# Altium footprint library Diode$.PcbLib: 98 footprints (part 3 of 7)
Each footprint in its own frame and in the unit in brackets; x right, y up, seen from the top. Pads: shape width x height; smd on the part's side, far side on the other; paste and mask are expansions set on the pad; w line width, h text height; cw(c..) or ccw(c..) is an arc to the next point about the centre after c.
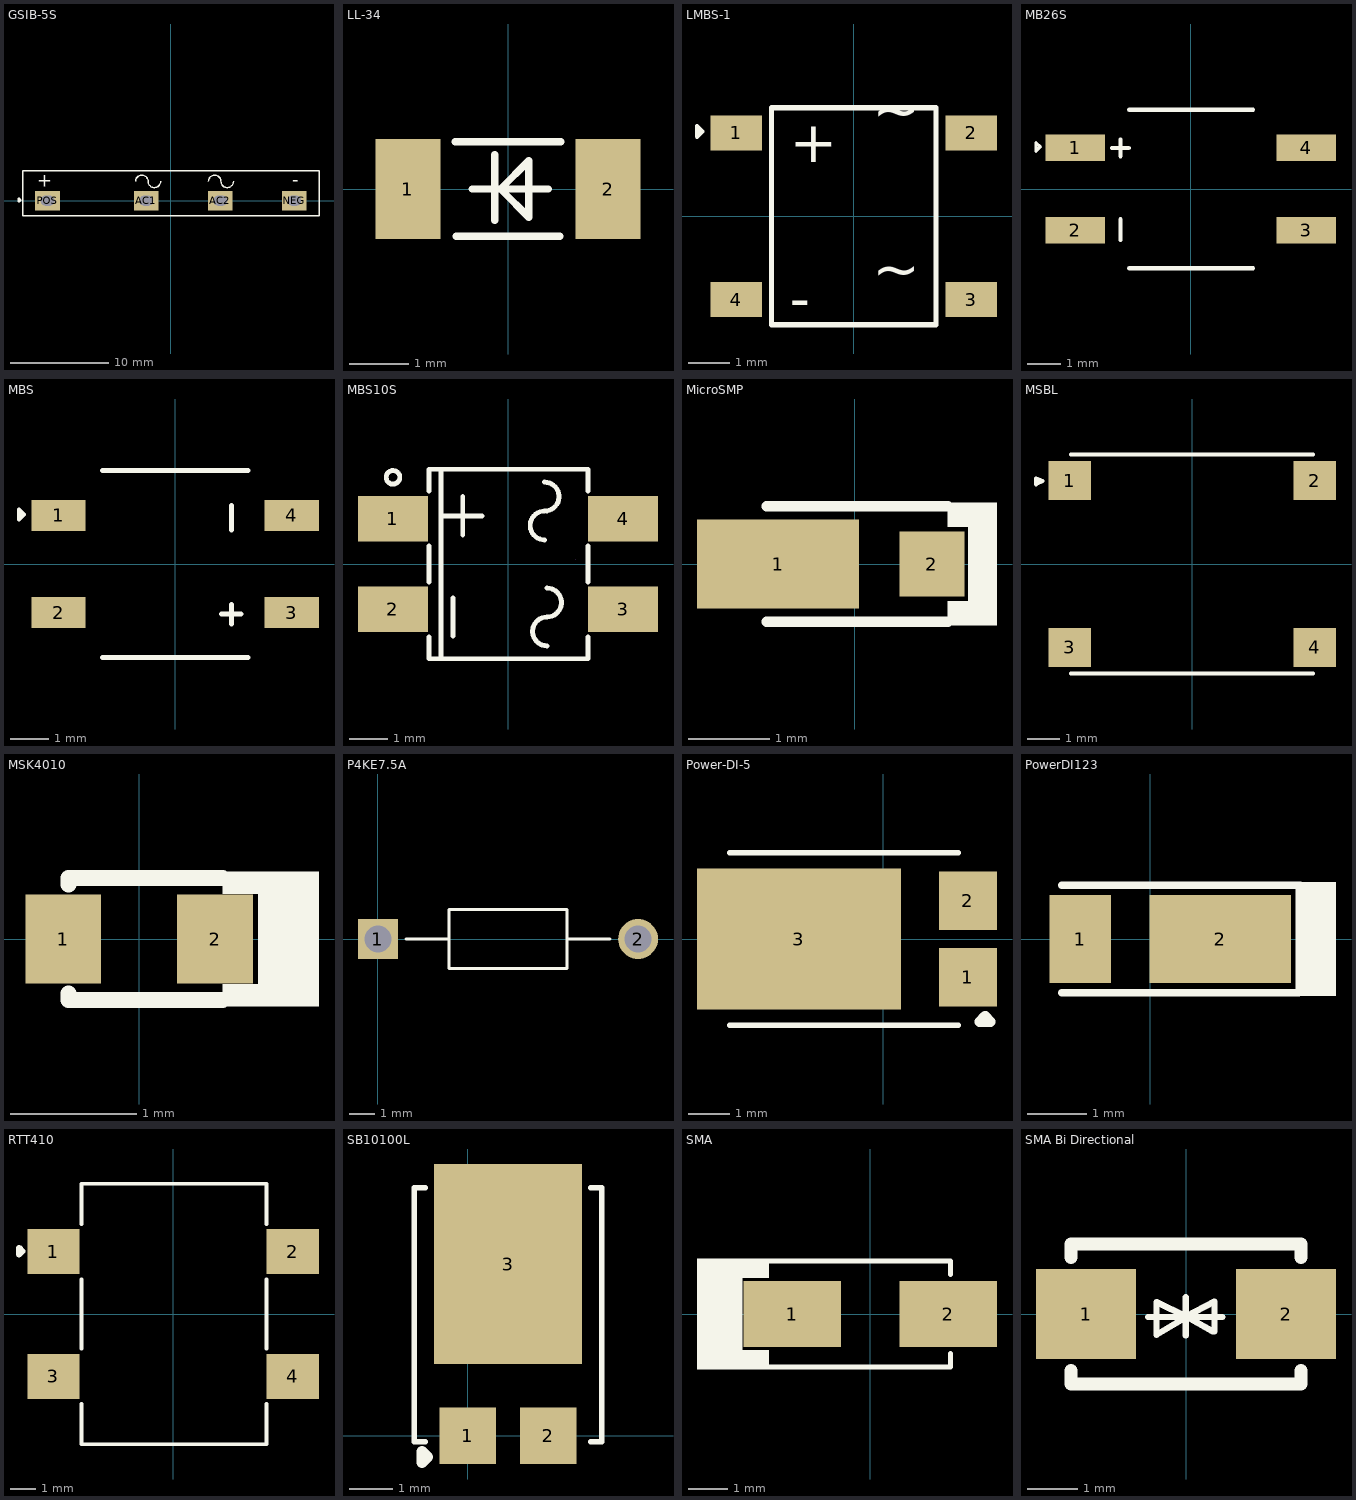
[diagram p2: the footprints below, top view; thin cyan lines are the x and y axes]

## GSIB-5S [mm]
pads (4):
  rect 2.5x2 hole 1 slot 1.37 at 0 deg: AC1(-2.5,0) AC2(5,0) NEG(12.5,0) POS(-12.5,0)
Top Overlay:
  lines w0.127: -3.585,1.956 cw(c-2.95,1.956) -2.315,1.956 ccw(c-1.68,1.956) -1.045,1.956 ; 3.797,1.956 cw(c4.432,1.956) 5.067,1.956 ccw(c5.702,1.956) 6.337,1.956 ; -15,-1.55 15,-1.55 15,3.05 -15,3.05 -15,-1.55
  lines w0.254: -15.396,-0.076 -15.396,0.178 -15.269,0.051 -15.396,-0.076
  text "+" at -12.043,2.584 h1.33
  text "-" at 12.951,2.493 h1.33
3D body "GSIB2560-E3-45.step": height 26.3, standoff -12, extent -15,-1.55 15,3.05

## LL-34 [mm]
pads (2):
  rect 1.1x1.7 smd paste+0 mask+0.051: 1(-1.7,0) 2(1.7,0)
Top Overlay:
  lines w0.127: -0.9,0.8 0.9,0.8 ; -0.878,-0.8 0.878,-0.8 ; -0.61,0 0.686,0 ; -0.229,-0.533 -0.229,0.584 ; -0.127,0 0.356,0.483 0.356,-0.483 -0.102,-0.025
3D body "C435829.step": height 1.5, standoff 0, extent -1.701,-0.745 1.702,0.745

## LMBS-1 [mm]
pads (4):
  rect 1.235x0.84 smd: 1(-2.817,2) 2(2.817,2) 3(2.817,-2) 4(-2.817,-2)
Top Overlay:
  lines w0.1: -3.759,1.905 -3.632,2.032 -3.759,2.159 -3.759,1.905
  lines w0.127: -1.971,-2.601 1.971,-2.601 1.971,2.601 -1.971,2.601 -1.971,-2.601
  text "+" at -1.53,1.29 h1
  text "-" at -1.53,-2.456 h1
  text "~" at 1.6,2.921 h1
  text "~" at 1.6,-0.889 h1
3D body "C435904.step": height 1.6, standoff 0, extent -3.1,-2.65 3.1,2.65

## MB26S [mm]
pads (4):
  rect 1.8x0.8 smd: 1(-3.5,1.25) 2(-3.5,-1.25) 3(3.5,-1.25) 4(3.5,1.25)
Top Overlay:
  lines w0.1: -4.694,1.148 -4.567,1.275 -4.694,1.402 -4.694,1.148
  lines w0.127: -2.388,1.245 -1.88,1.245 ; -2.134,-1.549 -2.134,-0.914 ; -2.134,0.991 -2.134,1.499 ; -1.867,-2.4 1.883,-2.4 ; -1.867,2.4 1.883,2.4
3D body "MB6S-TP.STEP": height 2.65, standoff 0.05, extent -3.497,-2.348 3.497,2.348

## MBS [mm]
pads (4):
  rect 1.4x0.8 smd: 1(-3,1.25) 2(-3,-1.25) 3(3,-1.25) 4(3,1.25)
Top Overlay:
  lines w0.1: -4.016,1.148 -4.016,1.402 -3.889,1.275 -4.016,1.148
  lines w0.127: -1.875,-2.4 1.875,-2.4 ; -1.875,2.4 1.875,2.4 ; 1.191,-1.29 1.699,-1.29 ; 1.445,-1.544 1.445,-1.036 ; 1.445,0.869 1.445,1.504
3D body "MB6S-TP.STEP": height 2.65, standoff 0.05, extent -3.497,-2.348 3.497,2.348

## MBS10S [mm]
pads (4):
  rect 1.84x1.2 smd paste+0 mask+0.051: 1(-3.037,1.2) 2(-3.036,-1.2) 3(3.037,-1.2) 4(3.036,1.2)
Top Overlay:
  circle w0.127: c-3.035,2.286 r0.18
  lines w0.127: -2.087,-1.921 -2.087,-2.5 2.113,-2.5 2.113,-1.921 ; -2.087,-0.479 -2.087,0.479 ; -2.087,1.921 -2.087,2.5 2.113,2.5 2.113,1.921 ; -1.763,-2.5 -1.763,2.5 ; -1.701,1.27 -0.685,1.27 ; -1.447,-1.905 -1.447,-0.889 ; -1.193,0.762 -1.193,1.778 ; 0.966,0.635 cw(c0.966,1.016) 0.966,1.397 ccw(c0.966,1.778) 0.966,2.159 ; 1.029,-2.159 cw(c1.029,-1.778) 1.029,-1.397 ccw(c1.029,-1.016) 1.029,-0.635 ; 2.113,-0.479 2.113,0.479
Mechanical 15:
  lines w0.003: 1.791,0.127 1.792,0.127
3D body "MBS10S (2).STEP": height 2.62, standoff 0, extent -3.475,-2.35 3.525,2.35

## MicroSMP [mm]
pads (2):
  rect 2x1.1 smd paste+0 mask+0.051: 1(-0.95,0)
  rect 0.8x0.8 smd paste+0 mask+0.051: 2(0.95,0)
Top Overlay:
  region: 1.753,0.762 1.397,0.762 1.397,-0.762 1.753,-0.762
  rectangle: 1.143,0.457 1.422,0.762
  rectangle: 1.143,-0.762 1.422,-0.457
  lines w0.127: -1.092,-0.711 1.143,-0.711 ; -1.092,0.711 1.143,0.711
3D body "MSP3V3HM3_89A.STEP": height 0.66, standoff 0, extent -1.25,-0.65 1.25,0.65

## MSBL [mm]
pads (4):
  rect 1.3x1.2 smd paste+0 mask+0.051: 1(-3.75,2.55) 2(3.75,2.55) 3(-3.75,-2.55) 4(3.75,-2.55)
Top Overlay:
  lines w0.127: -3.7,-3.35 0,-3.35 3.7,-3.35 ; -3.7,3.35 0,3.35 3.7,3.35 ; -4.775,2.438 -4.572,2.54 -4.775,2.616 -4.775,2.438

## MSK4010 [mm] "SOD-523 Schottky Barrier Diodes (SBD) ROHS"
pads (2):
  rect 0.6x0.7 smd: 1(-0.6,0) 2(0.6,0)
Top Overlay:
  rectangle: 0.66,0.356 1.422,0.533
  rectangle: 0.66,-0.533 1.422,-0.356
  rectangle: 0.94,-0.381 1.422,0.381
  lines w0.127: -0.559,-0.483 0.66,-0.483 ; -0.559,-0.482 -0.559,-0.432 ; -0.559,0.432 -0.559,0.482 ; -0.559,0.483 0.66,0.483
3D body "User Library-SOD-523F.step": height 0.7, standoff 0, extent -0.8,-0.399 0.8,0.399

## P4KE7.5A [mm]
pads (2):
  rect 1.59x1.59 hole 1.06: 1(0,0)
  round 1.59 hole 1.06: 2(10.36,0)
Top Overlay:
  lines w0.127: 1.115,0 2.83,0 ; 9.245,0 7.53,0 ; 2.83,0 2.83,1.175 7.53,1.175 7.53,0 ; 2.83,0 2.83,-1.175 7.53,-1.175 7.53,0

## Power-DI-5 [mm]
pads (3):
  rect 1.4x1.4 smd paste+0 mask+0.051: 1(2.032,-0.92) 2(2.032,0.92)
  rect 4.9x3.4 smd paste+0 mask+0.051: 3(-2.032,0)
Top Overlay:
  lines w0.127: -3.7,-2.075 1.8,-2.075 ; -3.7,2.075 1.8,2.075
  lines w0.254: 2.318,-1.991 2.445,-1.864 2.572,-1.991 2.318,-1.991
3D body "POWERDI5_DIO.step": height 1.2, standoff 0, extent -4.191,-2.019 2.413,2.019

## PowerDI123 [mm]
pads (2):
  rect 1.05x1.5 smd: 1(-1.187,0)
  rect 2.4x1.5 smd: 2(1.188,0)
Top Overlay:
  rectangle: 2.464,-0.965 3.15,0.965
  lines w0.127: -1.499,-0.914 2.515,-0.914 ; -1.499,0.914 2.54,0.914
3D body "DFLF1800-7.STEP": height 1, standoff 0, extent -1.494,-0.89 2.206,0.89

## RTT410 [mm]
pads (4):
  rect 2.1x1.8 smd: 1(-4.8,2.5) 2(4.8,2.5) 3(-4.8,-2.5) 4(4.8,-2.5)
Top Overlay:
  lines w0.152: -3.67,-3.607 -3.67,-5.22 3.741,-5.22 3.747,-5.214 3.747,-3.607 ; -3.67,-1.393 -3.67,1.393 ; -3.67,3.607 -3.67,5.22 3.741,5.22 3.747,5.214 3.747,3.607 ; 3.747,-1.393 3.747,1.393
  lines w0.254: -6.181,2.392 -6.054,2.519 -6.181,2.646 -6.181,2.392
3D body "TTL_DIO.step": height 1.81, standoff 0, extent -5.029,-5.169 5.029,5.169

## SB10100L [mm]
pads (3):
  rect 1.3x1.3 smd: 1(0,0) 2(1.86,0)
  rect 3.4x4.6 smd: 3(0.93,3.95)
Top Overlay:
  lines w0.127: -0.975,-0.133 -1.229,-0.133 -1.229,5.709 -0.975,5.709 ; 2.835,-0.133 3.089,-0.133 3.089,5.709 2.835,5.709
  lines w0.254: -1.051,-0.616 -1.051,-0.362 -0.924,-0.489 -1.051,-0.616
3D body "User Library-User Library-TO-277.step": height 1.2, standoff 0, extent -1.17,-0.412 3.03,6.038

## SMA [mm]
pads (2):
  rect 2.5x1.7 smd: 1(-2,0) 2(2,0)
Top Overlay:
  rectangle: -3.3,0.924 -2.596,1.422
  rectangle: -4.445,-1.422 -3.278,1.422
  rectangle: -3.3,-1.422 -2.596,-0.924
  lines w0.127: -2.658,-1.358 2.061,-1.358 2.061,-1.012 ; -2.658,1.358 2.061,1.358 2.061,1.012
3D body "User Library-DO-214AC SMA.step": height 2.4, standoff 0, extent -2.6,-1.3 2.6,1.3

## SMA Bi Directional [mm]
pads (2):
  rect 2x1.8 smd paste+0 mask+0.051: 1(-2,0) 2(2,0)
Top Overlay:
  lines w0.127: -0.76,-0.06 0.73,-0.06 ; -0.002,-0.43 -0.002,-0.049 ; -0.002,0.332 -0.002,-0.049 ; 0.54,-0.35 0.015,-0.058 -0.59,-0.414 -0.59,0.24 -0.002,-0.049 ; 0.57,-0.35 0.57,0.25 -0.002,-0.049
  lines w0.254: -2.3,-1.131 -2.3,-1.4 2.3,-1.4 2.3,-1.131 ; -2.3,1.131 -2.3,1.4 2.3,1.4 2.3,1.131
3D body "User Library-DO-214AC SMA.step": height 2.4, standoff 0, extent -2.6,-1.3 2.6,1.3